# Altium integrated library GRM155R61A104KA01J.IntLib: 1 symbol
Pins are listed as number, name and electrical type; pins without a type are passive.

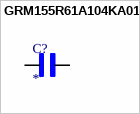
[diagram p0: symbol GRM155R61A104KA01J]

## GRM155R61A104KA01J
designator C?
0402 0.1 uF 10 V Â±10% Tolerance X5R SMT Multilayer Ceramic Capacitor; MF: Murata Electronics; MP: GRM155R61A104KA01J; SnapEDA_Link: https://www.snapeda.com/parts/GRM155R61A104KA01J/Murata+Electronics+North+America/view-part/?ref=snap; Package: 1005-2 Murata; Value: *; Check_prices: https://www.snapeda.com/parts/GRM155R61A104KA01J/Murata+Electronics+North+America/view-part/?ref=eda
footprint CAPC1005X55N
pins: 1, 2